# Altium footprint library KM_ALTIUM.PcbLib: 265 footprints (part 14 of 17)
Each footprint in its own frame and in the unit in brackets; x right, y up, seen from the top. Pads: shape width x height; smd on the part's side, far side on the other; paste and mask are expansions set on the pad; w line width, h text height; cw(c..) or ccw(c..) is an arc to the next point about the centre after c.
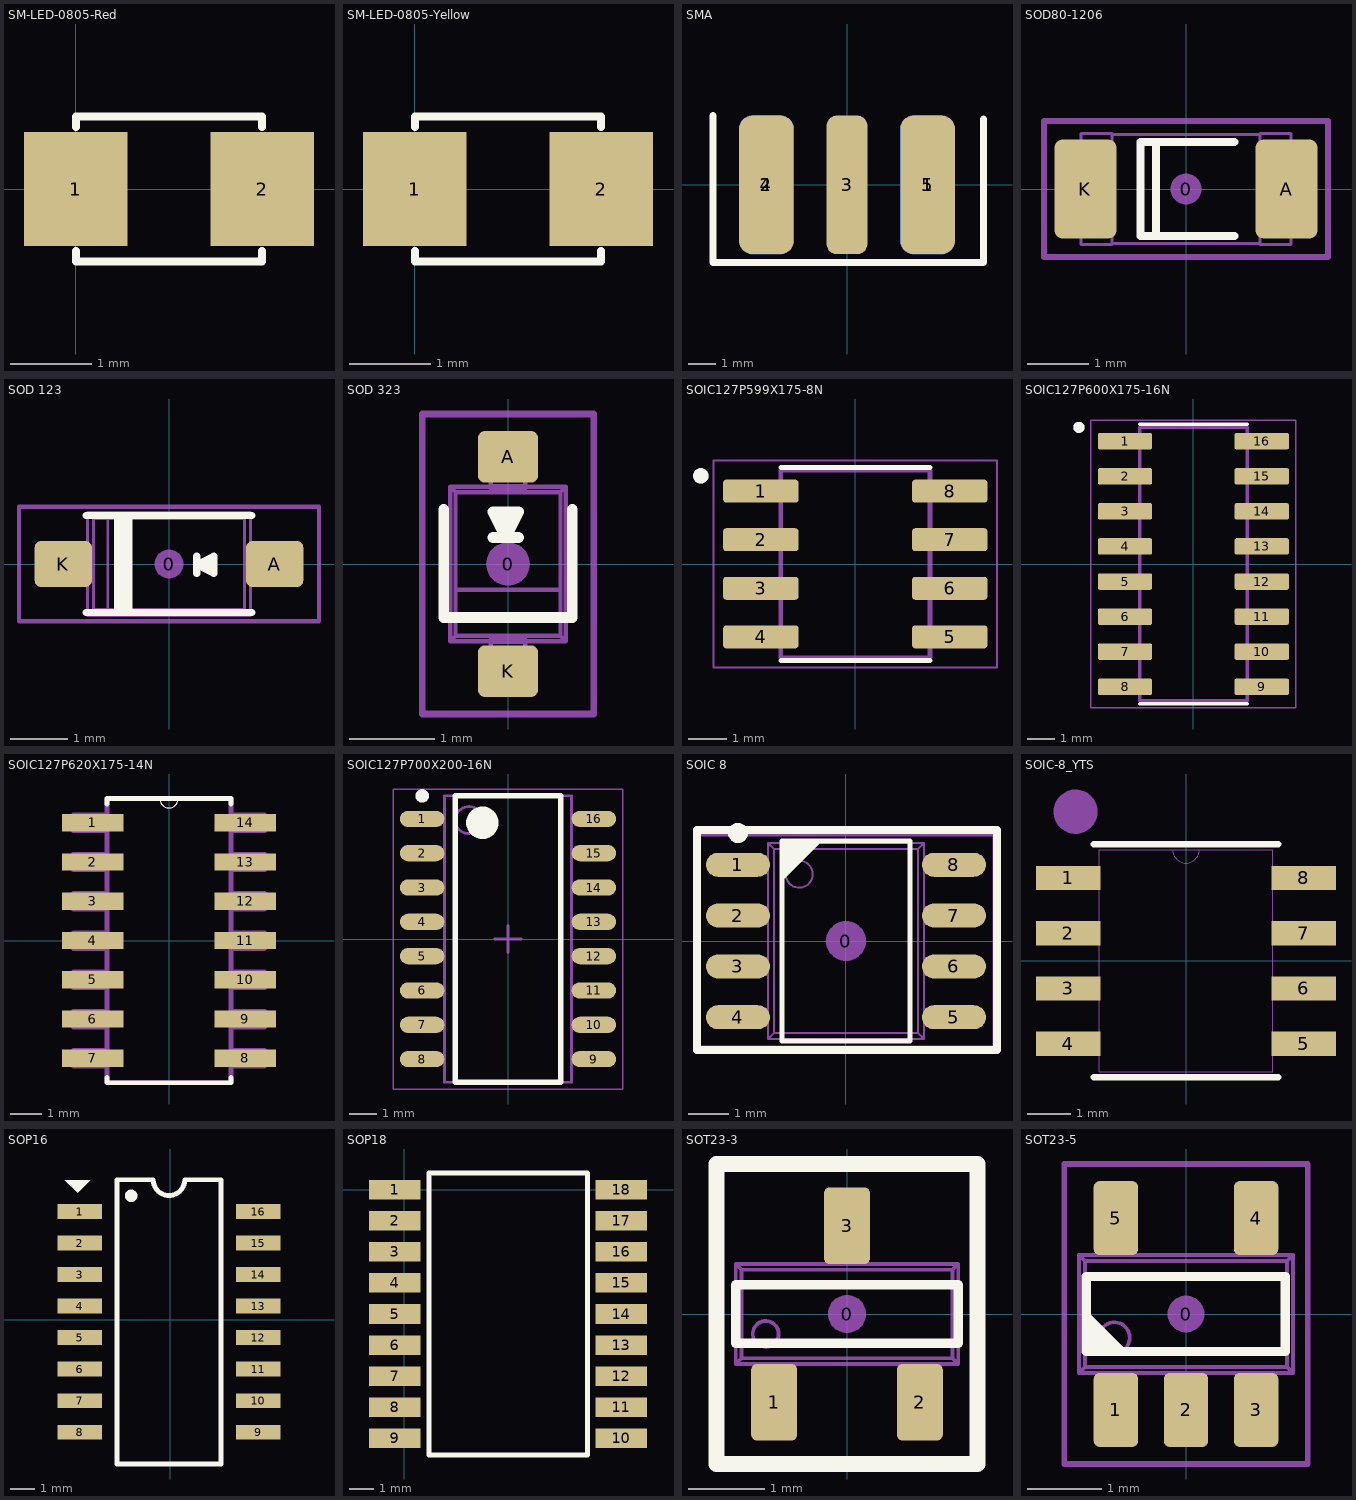
[diagram p13: the footprints below, top view; thin cyan lines are the x and y axes]

## SM-LED-0805-Red [mil]
pads (2):
  rect 50x55 smd: 1(0,0) 2(90,0)
Top Overlay:
  lines w4: 0,-30 0,-35 90,-35 90,-30 ; 0,30 0,35 90,35 90,30
3D body "User Library-led_0805-red.step": height 43.31, standoff 0, extent 5.25,-24.6 84.77,24.62

## SM-LED-0805-Yellow [mil]
pads (2):
  rect 50x55 smd: 1(0,0) 2(90,0)
Top Overlay:
  lines w4: 0,-30 0,-35 90,-35 90,-30 ; 0,30 0,35 90,35 90,30
3D body "User Library-led_0805-yellow.step": height 43.31, standoff 0, extent 5.25,-24.6 84.77,24.62

## SMA [mm]
pads (5):
  rrect50% 2x5.08 smd: 1(2.95,0) 2(-2.95,0)
  rrect50% 1.5x5.08 smd: 3(0,0)
  rrect50% 2x5.08 smd far side: 4(-2.95,0) 5(2.95,0)
Top Overlay:
  lines w0.254: -4.902,2.54 -4.902,-2.845 5.004,-2.845 5.004,2.413
3D body "User Library-142-0701-881.STEP": height 4.35, standoff -3.57, extent -4.709,-2.586 4.811,11.684

## SOD80-1206 [mm]
pads (3):
  round 0.508 on Mech15: 0(0,0)
  rrect25% 1x1.6 smd: A(1.627,0) K(-1.627,0)
Top Overlay:
  lines w0.127: -0.483,-0.762 -0.483,0.762 ; 0.787,-0.762 -0.737,-0.762 -0.737,0.762 0.787,0.762
Mechanical 13:
  lines w0.05: -1.2,-0.88 1.2,-0.88 ; -1.2,0.88 1.2,0.88 ; -1.7,-0.9 -1.7,0.9 -1.2,0.9 -1.2,-0.9 -1.7,-0.9 ; 1.2,-0.9 1.2,0.9 1.7,0.9 1.7,-0.9 1.2,-0.9
Mechanical 15:
  lines w0.1: -2.3,-1.1 2.3,-1.1 2.3,1.1 -2.3,1.1 -2.3,-1.1
3D body "User Library-smd diode 1206.step": height 1.46, standoff 0.01, extent -1.753,-0.725 1.747,0.725

## SOD 123 [mm]
pads (3):
  round 0.508 on Mech15: 0(0,0)
  rrect25% 1x0.8 smd: A(1.85,0) K(-1.85,0)
Top Overlay:
  lines w0.127: -1.45,-0.85 1.448,-0.85 ; -1.45,0.85 1.45,0.85 ; -0.9,-0.85 -0.9,0.85 ; -0.8,-0.85 -0.8,0.85 ; -0.7,-0.85 -0.7,0.85 ; 0.485,-0.162 0.485,0.138 ; 0.785,-0.012 0.485,-0.012 ; 0.485,-0.012 0.785,-0.162 0.785,0.138 0.485,-0.012
Mechanical 13:
  lines w0.05: -1.766,-0.308 -1.766,0.308 ; -1.707,-0.308 -1.707,0.308 ; -1.517,-0.308 -1.517,0.308 ; -1.425,-0.308 -1.95,-0.308 -1.95,0.308 -1.425,0.308 ; 1.425,-0.308 1.95,-0.308 1.95,0.308 1.425,0.308 ; 1.517,-0.308 1.517,0.308 ; 1.707,-0.308 1.707,0.308 ; 1.766,-0.308 1.766,0.308 ; -1.425,0.9 -1.323,0.798 ; -1.425,0.9 1.425,0.9 ; -1.425,0.9 -1.425,-0.9 1.425,-0.9 ; -1.323,0.798 -1.072,0.798 ; -1.323,0.798 -1.323,-0.798 -1.072,-0.798 ; -1.072,-0.798 1.322,-0.797 ; -1.072,-0.798 -1.072,0.798 ; -1.072,0.798 1.322,0.797 ; 1.322,-0.797 1.322,0.797 ; 1.322,-0.797 1.425,-0.9 ; 1.322,0.797 1.425,0.9 ; 1.425,-0.9 1.425,0.9
Mechanical 15:
  lines w0.076: -2.625,-1 2.625,-1 2.625,1 -2.625,1 -2.625,-1
3D body "SOD123.STEP": height 1.18, standoff 0, extent -1.95,-0.9 1.95,0.9

## SOD 323 [mm]
pads (3):
  round 0.508 on Mech15: 0(0,0)
  rrect25% 0.7x0.6 smd: A(0,1.25) K(0,-1.25)
Top Overlay:
  lines w0.127: -0.75,0.635 -0.75,-0.625 0.75,-0.625 0.75,0.635 ; -0.175,0.31 0.125,0.31 ; -0.025,0.61 -0.025,0.31 ; -0.025,0.31 0.125,0.61 -0.175,0.61 -0.025,0.31
Mechanical 13:
  lines w0.05: -0.2,-1.157 0.2,-1.157 ; -0.2,-1.11 0.2,-1.11 ; -0.2,-0.91 0.2,-0.91 ; -0.2,-0.9 -0.675,-0.9 ; -0.2,0.9 -0.675,0.9 ; -0.2,0.91 0.2,0.91 ; -0.2,1.11 0.2,1.11 ; -0.2,1.157 0.2,1.157 ; 0.2,-0.9 0.675,-0.9 ; 0.2,0.9 0.675,0.9 ; -0.675,-0.9 -0.675,0.9 ; -0.675,-0.9 -0.613,-0.838 ; -0.675,0.9 -0.613,0.838 ; -0.613,-0.838 0.613,-0.838 ; -0.613,-0.838 -0.613,-0.3 ; -0.613,-0.3 0.613,-0.3 ; -0.613,-0.3 -0.613,0.838 ; -0.613,0.838 0.613,0.838 ; 0.613,-0.838 0.613,-0.3 ; 0.613,-0.838 0.675,-0.9 ; 0.613,-0.3 0.613,0.838 ; 0.613,0.838 0.675,0.9 ; 0.675,-0.9 0.675,0.9 ; -0.2,-1.3 0.2,-1.3 0.2,-0.879 -0.2,-0.879 -0.2,-1.3 ; -0.2,0.879 -0.2,1.3 0.2,1.3 0.2,0.879 -0.2,0.879
Mechanical 15:
  lines w0.076: -1,-1.75 -1,1.75 1,1.75 1,-1.75 -1,-1.75
3D body "SOD323.STEP": height 1.1, standoff 0, extent -0.675,-1.3 0.675,1.3

## SOIC127P599X175-8N [mm]
pads (8):
  rrect25% 1.97x0.6 smd: 1(-2.47,1.905) 2(-2.47,0.635) 3(-2.47,-0.635) 4(-2.47,-1.905) 5(2.47,-1.905) 6(2.47,-0.635) 7(2.47,0.635) 8(2.47,1.905)
Top Overlay:
  circle w0.2: c-4.04,2.305 r0.1
  lines w0.127: -1.95,-2.525 1.95,-2.525 ; -1.95,2.525 1.95,2.525
Mechanical 13:
  circle w0.2: c-4.04,2.305 r0.1
  lines w0.127: -1.95,-2.452 1.95,-2.452 1.95,2.452 -1.95,2.452 -1.95,-2.452
Mechanical 15:
  lines w0.05: -3.705,-2.702 3.705,-2.702 3.705,2.702 -3.705,2.702 -3.705,-2.702
3D body "step_temp.STEP": height 1.75, standoff 0, extent -3,-2.45 3,2.45

## SOIC127P600X175-16N [mm]
pads (16):
  rrect25% 1.97x0.6 smd paste+0 mask+0.102: 1(-2.475,4.445) 2(-2.475,3.175) 3(-2.475,1.905) 4(-2.475,0.635) 5(-2.475,-0.635) 6(-2.475,-1.905) 7(-2.475,-3.175) 8(-2.475,-4.445) 9(2.475,-4.445) 10(2.475,-3.175) 11(2.475,-1.905) 12(2.475,-0.635) 13(2.475,0.635) 14(2.475,1.905) 15(2.475,3.175) 16(2.475,4.445)
Top Overlay:
  circle w0.2: c-4.145,4.945 r0.1
  lines w0.127: -1.95,-5.065 1.95,-5.065 ; -1.95,5.065 1.95,5.065
Mechanical 13:
  circle w0.2: c-4.145,4.945 r0.1
  lines w0.127: -1.95,-4.95 -1.95,4.95 1.95,4.95 1.95,-4.95 -1.95,-4.95
Mechanical 15:
  lines w0.05: -3.71,-5.2 -3.71,5.2 3.71,5.2 3.71,-5.2 -3.71,-5.2
3D body "step_temp.STEP": height 1.75, standoff 0, extent -3,-4.95 3,4.95

## SOIC127P620X175-14N [mil]
pads (14):
  rect 78x22 smd paste+0 mask+4.02: 1(-97,150) 2(-97,100) 3(-97,50) 4(-97,0) 5(-97,-50) 6(-97,-100) 7(-97,-150) 8(97,-150) 9(97,-100) 10(97,-50) 11(97,0) 12(97,50) 13(97,100) 14(97,150)
Top Overlay:
  lines w0: -12,181 ccw(c0,181) 12,181
  lines w6: -79,-174 -79,-181 79,-181 79,-174 ; -79,174 -79,181 -12,181 12,181 79,181 79,174
Mechanical 13:
  lines w0: -12,181 ccw(c0,181) 12,181
  lines w6: -122,-160 -122,-140 -79,-140 -79,-160 -122,-160 ; -122,-110 -122,-90 -79,-90 -79,-110 -122,-110 ; -122,-60 -122,-40 -79,-40 -79,-60 -122,-60 ; -122,-10 -122,10 -79,10 -79,-10 -122,-10 ; -122,40 -122,60 -79,60 -79,40 -122,40 ; -122,90 -122,110 -79,110 -79,90 -122,90 ; -122,140 -122,160 -79,160 -79,140 -122,140 ; -79,-181 79,-181 79,181 12,181 -12,181 -79,181 -79,-181 ; 79,-160 79,-140 122,-140 122,-160 79,-160 ; 79,-110 79,-90 122,-90 122,-110 79,-110 ; 79,-60 79,-40 122,-40 122,-60 79,-60 ; 79,-10 79,10 122,10 122,-10 79,-10 ; 79,40 79,60 122,60 122,40 79,40 ; 79,90 79,110 122,110 122,90 79,90 ; 79,140 79,160 122,160 122,140 79,140
3D body "step_temp.STEP": height 68.9, standoff 0, extent -118.11,-170.28 118.11,170.28

## SOIC127P700X200-16N [mm] "SOIC, 16-Leads, Body 10,28x4,40mm, Pitch 1,27mm, IPC Medium Density"
height 2
pads (16):
  oval 1.65x0.6 smd: 1(-3.175,4.445) 2(-3.175,3.175) 3(-3.175,1.905) 4(-3.175,0.635) 5(-3.175,-0.635) 6(-3.175,-1.905) 7(-3.175,-3.175) 8(-3.175,-4.445) 9(3.175,-4.445) 10(3.175,-3.175) 11(3.175,-1.905) 12(3.175,-0.635) 13(3.175,0.635) 14(3.175,1.905) 15(3.175,3.175) 16(3.175,4.445)
Top Overlay:
  circle w0.6: c-0.95,4.3 r0.3
  circle w0.25: c-3.175,5.295 r0.125
  lines w0.2: -1.95,-5.3 1.95,-5.3 1.95,5.3 -1.95,5.3 -1.95,-5.3
Mechanical 13:
  circle w0.1: c-1.45,4.4 r0.5
  lines w0.1: -2.35,-5.3 2.35,-5.3 2.35,5.3 -2.35,5.3 -2.35,-5.3
Mechanical 15:
  lines w0.05: -4.25,-5.55 4.25,-5.55 4.25,5.55 -4.25,5.55 -4.25,-5.55
  lines w0.1: -0.5,0 0.5,0 ; 0,-0.5 0,0.5
3D body: height 2, standoff 0.1, extent -2.35,-5.3 2.35,5.3

## SOIC 8 [mm] "8-Pin Small Outline Integrated Circuit 1.27 mm Pitch, IPC Medium Density"
height 1.75
pads (9):
  round 1 on Mech15: 0(0,0)
  oval 1.6x0.6 smd: 1(-2.7,1.905) 2(-2.7,0.635) 3(-2.7,-0.635) 4(-2.7,-1.905) 5(2.7,-1.905) 6(2.7,-0.635) 7(2.7,0.635) 8(2.7,1.905)
Top Overlay:
  circle w0.25: c-2.7,2.7 r0.125
  region: -1.6,2.5 -0.6,2.5 -1.6,1.5
  lines w0.127: -1.6,-2.5 1.6,-2.5 1.6,2.5 -1.6,2.5 -1.6,-2.5
  lines w0.203: -3.725,-2.725 -3.725,2.775 3.775,2.775 3.775,-2.725 -3.725,-2.725
Mechanical 13:
  circle w0.05: c-1.17,1.67 r0.338
  lines w0.05: -2.631,-2.115 -2.631,-1.695 ; -2.631,-0.845 -2.631,-0.425 ; -2.631,0.425 -2.631,0.845 ; -2.631,1.695 -2.631,2.115 ; -2.543,-2.115 -2.543,-1.695 ; -2.543,-0.845 -2.543,-0.425 ; -2.543,0.425 -2.543,0.845 ; -2.543,1.695 -2.543,2.115 ; -2.403,-2.115 -2.403,-1.695 ; -2.403,-0.845 -2.403,-0.425 ; -2.403,0.425 -2.403,0.845 ; -2.403,1.695 -2.403,2.115 ; -2.113,-2.115 -2.113,-1.695 ; -2.113,-0.845 -2.113,-0.425 ; -2.113,0.425 -2.113,0.845 ; -2.113,1.695 -2.113,2.115 ; -1.95,-2.115 -3,-2.115 -3,-1.695 -1.95,-1.695 ; -1.95,-0.845 -3,-0.845 -3,-0.425 -1.95,-0.425 ; -1.95,0.425 -3,0.425 -3,0.845 -1.95,0.845 ; -1.95,1.695 -3,1.695 -3,2.115 -1.95,2.115 ; 1.95,-2.115 3,-2.115 3,-1.695 1.95,-1.695 ; 1.95,-0.845 3,-0.845 3,-0.425 1.95,-0.425 ; 1.95,0.425 3,0.425 3,0.845 1.95,0.845 ; 1.95,1.695 3,1.695 3,2.115 1.95,2.115 ; 2.113,-2.115 2.113,-1.695 ; 2.113,-0.845 2.113,-0.425 ; 2.113,0.425 2.113,0.845 ; 2.113,1.695 2.113,2.115 ; 2.403,-2.115 2.403,-1.695 ; 2.403,-0.845 2.403,-0.425 ; 2.403,0.425 2.403,0.845 ; 2.403,1.695 2.403,2.115 ; 2.543,-2.115 2.543,-1.695 ; 2.543,-0.845 2.543,-0.425 ; 2.543,0.425 2.543,0.845 ; 2.543,1.695 2.543,2.115 ; 2.631,-2.115 2.631,-1.695 ; 2.631,-0.845 2.631,-0.425 ; 2.631,0.425 2.631,0.845 ; 2.631,1.695 2.631,2.115 ; -1.95,-2.45 -1.801,-2.301 ; -1.95,-2.45 -1.95,2.45 ; -1.95,-2.45 1.95,-2.45 ; -1.95,2.45 1.95,2.45 ; -1.95,2.45 -1.801,2.301 ; -1.801,-2.301 -1.801,2.301 ; -1.801,-2.301 1.801,-2.301 ; -1.801,2.301 1.801,2.301 ; 1.801,-2.301 1.801,2.301 ; 1.801,-2.301 1.95,-2.45 ; 1.801,2.301 1.95,2.45 ; 1.95,-2.45 1.95,2.45
Mechanical 15:
  lines w0.076: -3.7,-2.65 3.7,-2.65 3.7,2.65 -3.7,2.65 -3.7,-2.65
3D body "SOIC-8.STEP": height 1.75, standoff 0, extent -3,-2.45 3,2.45

## SOIC-8_YTS [mil]
pads (8):
  rect 58.56x21.97 smd paste+0 mask+0: 1(-106.5,75) 2(-106.5,25) 3(-106.5,-25) 4(-106.5,-75) 5(106.5,-75) 6(106.5,-25) 7(106.5,25) 8(106.5,75)
Top Overlay:
  lines w6: -83.5,-105.5 83.5,-105.5 ; -83.5,105.5 83.5,105.5
Mechanical 13:
  lines w1: -12,100.5 ccw(c0,100.5) 12,100.5 ; -122,-85 -122,-65 -78.5,-65 -78.5,-85 -122,-85 ; -122,-35 -122,-15 -78.5,-15 -78.5,-35 -122,-35 ; -122,15 -122,35 -78.5,35 -78.5,15 -122,15 ; -122,65 -122,85 -78.5,85 -78.5,65 -122,65 ; -78.5,-100.5 78.5,-100.5 78.5,100.5 -78.5,100.5 -78.5,-100.5 ; 78.5,-85 78.5,-65 122,-65 122,-85 78.5,-85 ; 78.5,-35 78.5,-15 122,-15 122,-35 78.5,-35 ; 78.5,15 78.5,35 122,35 122,15 78.5,15 ; 78.5,65 78.5,85 122,85 122,65 78.5,65
Mechanical 15:
  circle w20: c-100,135 r10
3D body "SOIC-8_YTS.step": height 69.09, standoff 0, extent -122.01,-100.51 122.01,100.51

## SOP16 [mm]
pads (16):
  rect 1.8x0.6 smd: 1(-3.651,4.369) 2(-3.651,3.099) 3(-3.651,1.829) 4(-3.651,0.559) 5(-3.651,-0.711) 6(-3.651,-1.981) 7(-3.651,-3.251) 8(-3.651,-4.521) 9(3.549,-4.521) 10(3.549,-3.251) 11(3.549,-1.981) 12(3.549,-0.711) 13(3.549,0.559) 14(3.549,1.829) 15(3.549,3.099) 16(3.549,4.369)
Top Overlay:
  circle w0.25: c-1.575,5.002 r0.125
  region: -4.242,5.639 -3.734,5.131 -3.226,5.639
  lines w0.2: -2.151,-5.801 -2.151,5.649 -0.686,5.649 ccw(c-0.051,5.649) 0.584,5.649 2.049,5.649 2.049,-5.801 -2.151,-5.801
3D body "User Library-SOP16_208mil (5_3mm).STEP": height 2.01, standoff 0.01, extent -4.011,-5.151 3.909,5.049

## SOP18 [mm]
pads (18):
  rect 2.1x0.8 smd: 1(-0.381,0) 2(-0.381,-1.27) 3(-0.381,-2.54) 4(-0.381,-3.81) 5(-0.381,-5.08) 6(-0.381,-6.35) 7(-0.381,-7.62) 8(-0.381,-8.89) 9(-0.381,-10.16) 10(8.881,-10.16) 11(8.881,-8.89) 12(8.881,-7.62) 13(8.881,-6.35) 14(8.881,-5.08) 15(8.881,-3.81) 16(8.881,-2.54) 17(8.881,-1.27) 18(8.881,0)
Top Overlay:
  lines w0.2: 1.016,-10.845 7.493,-10.845 7.493,0.685 1.016,0.685 1.016,-10.845
Mechanical 3:
  lines w0.1: 1.016,-10.845 1.016,0.685 7.493,0.685 7.493,-10.845 1.016,-10.845
3D body "User Library-IPC SOP18.step": height 2.65, standoff 0, extent -0.832,-10.845 9.468,0.685

## SOT23-3 [mm]
pads (4):
  round 0.5 on Mech15: 0(0,0)
  rrect25% 0.6x1 smd: 1(-0.95,-1.15) 2(0.95,-1.15) 3(0,1.15)
Top Overlay:
  lines w0.127: -1.45,-0.381 1.45,-0.381 1.45,0.381 -1.45,0.381 -1.45,-0.381
  lines w0.203: -1.702,-1.956 1.702,-1.956 1.702,1.956 -1.702,1.956 -1.702,-1.956
Mechanical 13:
  circle w0.05: c-1.06,-0.26 r0.169
  lines w0.05: -1.19,-1.19 -0.71,-1.19 ; -1.19,-1.099 -0.71,-1.099 ; -1.19,-1.074 -0.71,-1.074 ; -1.19,-0.825 -0.71,-0.825 ; -1.19,-0.65 -1.19,-1.4 -0.71,-1.4 -0.71,-0.65 ; -0.24,0.65 -0.24,1.4 0.24,1.4 0.24,0.65 ; -0.24,0.825 0.24,0.825 ; -0.24,1.074 0.24,1.074 ; -0.24,1.099 0.24,1.099 ; -0.24,1.19 0.24,1.19 ; 0.71,-1.19 1.19,-1.19 ; 0.71,-1.099 1.19,-1.099 ; 0.71,-1.074 1.19,-1.074 ; 0.71,-0.825 1.19,-0.825 ; 0.71,-0.65 0.71,-1.4 1.19,-1.4 1.19,-0.65 ; -1.45,-0.65 1.45,-0.65 ; -1.45,-0.65 -1.376,-0.576 ; -1.45,-0.65 -1.45,0.65 ; -1.45,0.65 1.45,0.65 ; -1.45,0.65 -1.376,0.576 ; -1.376,-0.576 -1.376,0.576 ; -1.376,-0.576 1.376,-0.576 ; -1.376,0.576 1.376,0.576 ; 1.376,-0.576 1.45,-0.65 ; 1.376,-0.576 1.376,0.576 ; 1.376,0.576 1.45,0.65 ; 1.45,-0.65 1.45,0.65
Mechanical 15:
  lines w0.076: -1.75,-1.9 -1.75,1.9 1.75,1.9 1.75,-1.9 -1.75,-1.9
3D body "SOT23-3.STEP": height 1.29, standoff -0.01, extent -1.45,-1.4 1.45,1.4

## SOT23-5 [mm]
pads (6):
  round 0.5 on Mech15: 0(0,0)
  rrect25% 0.6x1 smd: 1(-0.95,-1.3) 2(0,-1.3) 3(0.95,-1.3) 4(0.95,1.3) 5(-0.95,1.3)
Top Overlay:
  region: -1.353,-0.508 -1.353,0.053 -0.792,-0.508
  lines w0.127: -1.353,-0.508 1.347,-0.508 1.347,0.508 -1.353,0.508 -1.353,-0.508
  text "." at -0.95,-2.275 h0.1
Mechanical 13:
  circle w0.05: c-0.97,-0.32 r0.208
  lines w0.05: -1.15,-1.191 -0.75,-1.191 ; -1.15,-1.1 -0.75,-1.1 ; -1.15,-1.094 -0.75,-1.094 ; -1.15,-0.844 -0.75,-0.844 ; -1.15,-0.8 -1.15,-1.4 -0.75,-1.4 -0.75,-0.8 ; -1.15,0.8 -1.15,1.4 -0.75,1.4 -0.75,0.8 ; -1.15,0.844 -0.75,0.844 ; -1.15,1.094 -0.75,1.094 ; -1.15,1.1 -0.75,1.1 ; -1.15,1.191 -0.75,1.191 ; -0.2,-1.191 0.2,-1.191 ; -0.2,-1.1 0.2,-1.1 ; -0.2,-1.094 0.2,-1.094 ; -0.2,-0.844 0.2,-0.844 ; -0.2,-0.8 -0.2,-1.4 0.2,-1.4 0.2,-0.8 ; 0.75,-1.191 1.15,-1.191 ; 0.75,-1.1 1.15,-1.1 ; 0.75,-1.094 1.15,-1.094 ; 0.75,-0.844 1.15,-0.844 ; 0.75,-0.8 0.75,-1.4 1.15,-1.4 1.15,-0.8 ; 0.75,0.8 0.75,1.4 1.15,1.4 1.15,0.8 ; 0.75,0.844 1.15,0.844 ; 0.75,1.094 1.15,1.094 ; 0.75,1.1 1.15,1.1 ; 0.75,1.191 1.15,1.191 ; -1.45,-0.8 1.45,-0.8 ; -1.45,-0.8 -1.369,-0.719 ; -1.45,-0.8 -1.45,0.8 ; -1.45,0.8 1.45,0.8 ; -1.45,0.8 -1.369,0.719 ; -1.369,-0.719 -1.369,0.719 ; -1.369,-0.719 1.369,-0.719 ; -1.369,0.719 1.369,0.719 ; 1.369,-0.719 1.45,-0.8 ; 1.369,-0.719 1.369,0.719 ; 1.369,0.719 1.45,0.8 ; 1.45,-0.8 1.45,0.8
Mechanical 15:
  lines w0.076: -1.651,-2.032 -1.651,2.032 1.651,2.032 1.651,-2.032 -1.651,-2.032
3D body "SOT23-5.STEP": height 1.44, standoff -0.01, extent -1.45,-1.4 1.45,1.4